# Altium footprint library PBL - SMD Packages.PcbLib: 144 footprints (part 6 of 9)
Each footprint in its own frame and in the unit in brackets; x right, y up, seen from the top. Pads: shape width x height; smd on the part's side, far side on the other; paste and mask are expansions set on the pad; w line width, h text height; cw(c..) or ccw(c..) is an arc to the next point about the centre after c.
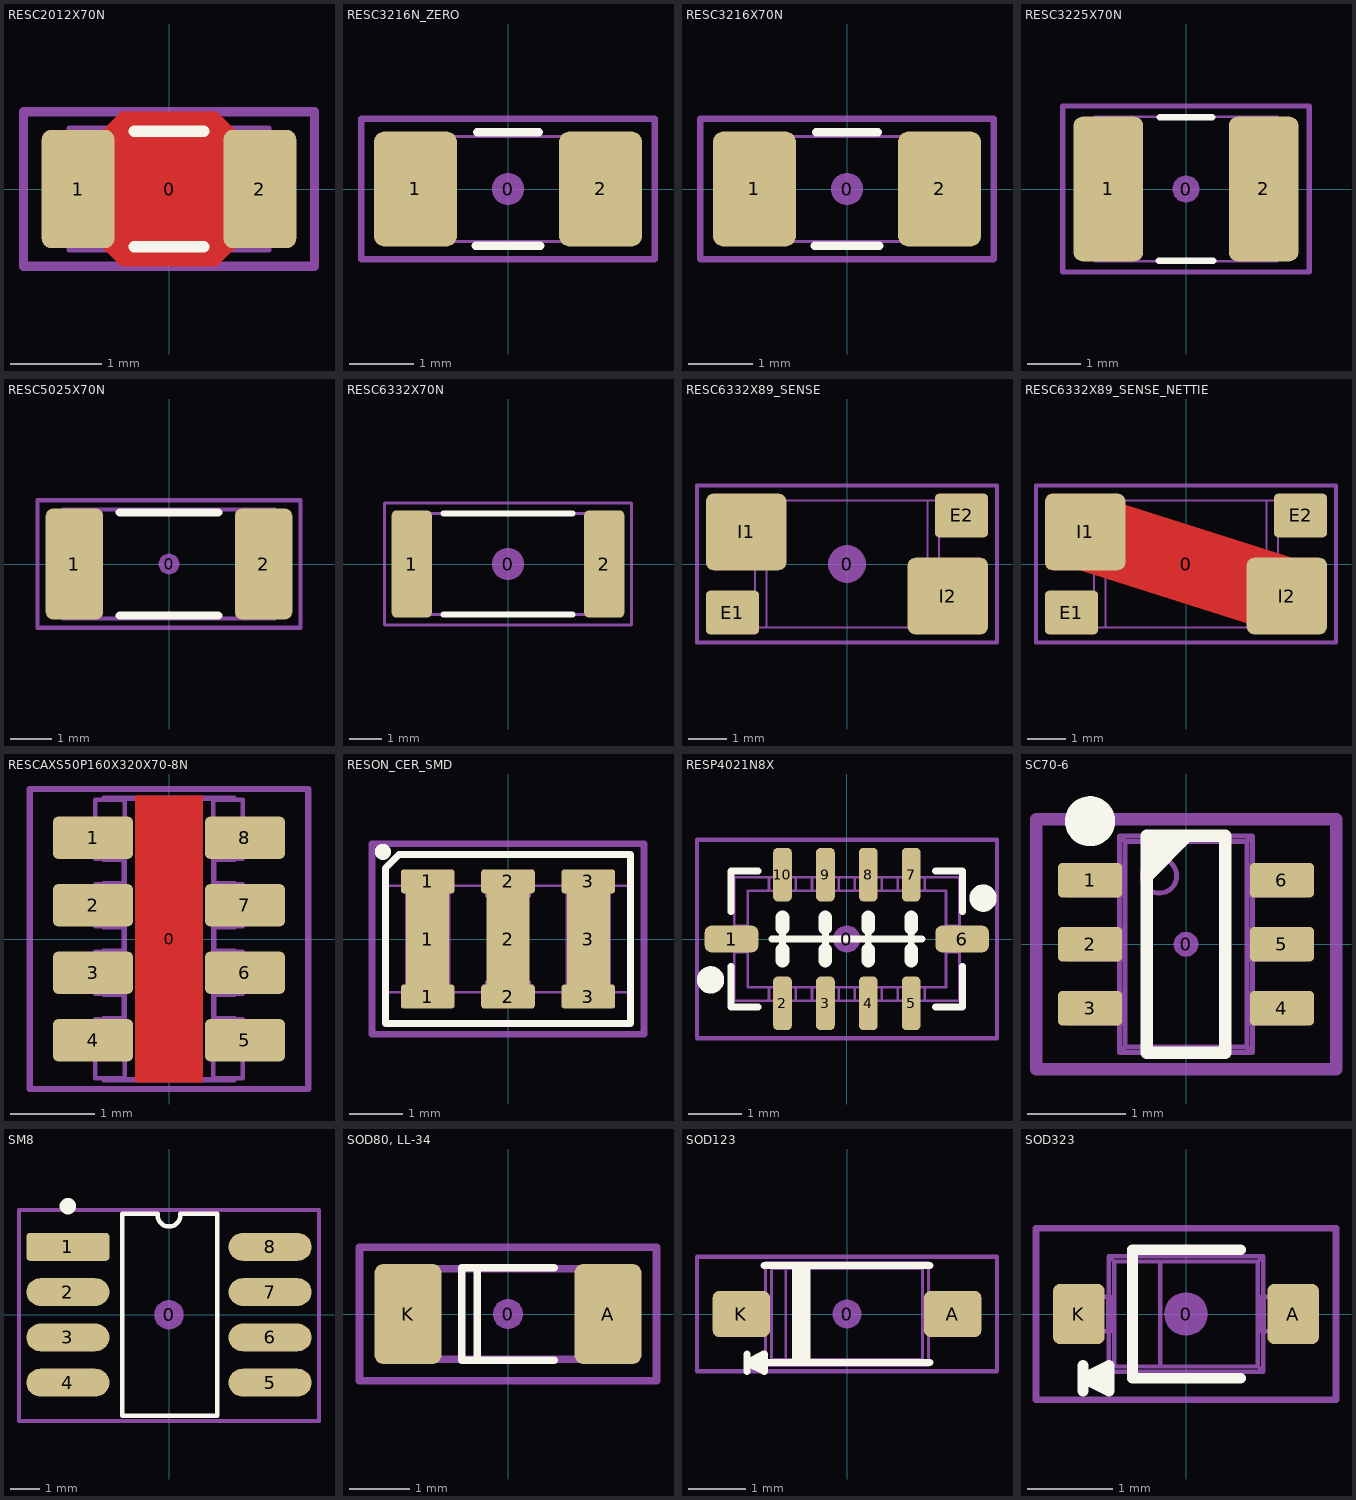
[diagram p5: the footprints below, top view; thin cyan lines are the x and y axes]

## RESC2012X70N [mm] "Chip Resistor, Body 2.0x1.2mm, EIA 0805, IPC Medium Density"
height 0.7
pads (3):
  round 0.254 on Mech15: 0(0,0)
  rrect25% 0.8x1.3 smd: 1(-1,0) 2(1,0)
Top Layer:
  pour cut-out: -0.725,0.65 -0.525,0.85 0.525,0.85 0.725,0.65 0.725,-0.65 0.525,-0.85 -0.525,-0.85 -0.725,-0.65
Top Overlay:
  lines w0.127: -0.381,-0.635 0.381,-0.635 ; -0.381,0.635 0.381,0.635
13 - 3D Top Side:
  lines w0.05: 0.6,-0.674 -0.6,-0.674 ; -0.6,-0.675 -0.6,0.675 -1.1,0.675 -1.1,-0.675 -0.6,-0.675 ; -0.6,-0.674 0.6,-0.674 ; 0.6,-0.675 0.6,0.675 ; 0.6,-0.675 1.1,-0.675 1.1,0.675 0.6,0.675 ; 0.6,0.674 -0.6,0.674 0.6,0.674
15 - Top Courtyards:
  lines w0.1: -1.6,-0.85 1.6,-0.85 1.6,0.85 -1.6,0.85 -1.6,-0.85
3D body: height 0.69, standoff -0.01, extent -1.1,-0.675 1.1,0.675

## RESC3216N_ZERO [mm] "Chip Resistor, Body 3.2x1.6mm, 1206, IPC Medium Density"
height 0.7
pads (3):
  round 0.508 on Mech15: 0(0,0)
  rrect25% 1.3x1.8 smd: 1(-1.45,0) 2(1.45,0)
Top Overlay:
  lines w0.127: -0.508,-0.889 0.508,-0.889 ; -0.483,0.889 0.483,0.889
13 - 3D Top Side:
  lines w0.05: 1.025,-0.824 -1.025,-0.824 1.025,-0.824 ; -1.625,-0.825 -1.025,-0.825 -1.025,0.825 -1.625,0.825 -1.625,-0.825 ; -1.025,0.824 1.025,0.824 -1.025,0.824 ; 1.025,-0.825 1.025,0.825 1.625,0.825 1.625,-0.825 1.025,-0.825
15 - Top Courtyards:
  lines w0.1: -2.3,-1.1 -2.3,1.1 2.3,1.1 2.3,-1.1 -2.3,-1.1
3D body: height 0.69, standoff -0.01, extent -1.625,-0.825 1.625,0.825

## RESC3216X70N [mm] "Chip Resistor, Body 3.2x1.6mm, EIA 1206, IPC Medium Density"
height 0.7
pads (3):
  round 0.508 on Mech15: 0(0,0)
  rrect25% 1.3x1.8 smd: 1(-1.45,0) 2(1.45,0)
Top Overlay:
  lines w0.127: -0.508,-0.889 0.508,-0.889 ; -0.483,0.889 0.483,0.889
13 - 3D Top Side:
  lines w0.05: 1.025,-0.824 -1.025,-0.824 1.025,-0.824 ; -1.625,-0.825 -1.025,-0.825 -1.025,0.825 -1.625,0.825 -1.625,-0.825 ; -1.025,0.824 1.025,0.824 -1.025,0.824 ; 1.025,-0.825 1.025,0.825 1.625,0.825 1.625,-0.825 1.025,-0.825
15 - Top Courtyards:
  lines w0.1: -2.3,-1.1 -2.3,1.1 2.3,1.1 2.3,-1.1 -2.3,-1.1
3D body: height 0.69, standoff -0.01, extent -1.625,-0.825 1.625,0.825

## RESC3225X70N [mm] "Chip Resistor, Body 3.2x2.5mm, EIA 1210, IPC Medium Density"
height 0.7
pads (3):
  round 0.508 on Mech15: 0(0,0)
  rrect25% 1.3x2.7 smd: 1(-1.45,0) 2(1.45,0)
Top Overlay:
  lines w0.127: -0.508,-1.339 0.508,-1.339 ; -0.483,1.339 0.483,1.339
13 - 3D Top Side:
  lines w0.05: -1.7,-1.35 -1.1,-1.35 -1.1,1.35 -1.7,1.35 -1.7,-1.35 ; -1.1,-1.349 1.1,-1.349 -1.1,-1.349 ; -1.1,1.349 1.1,1.349 -1.1,1.349 ; 1.1,-1.35 1.1,1.35 1.7,1.35 1.7,-1.35 1.1,-1.35
15 - Top Courtyards:
  lines w0.1: -2.3,-1.55 -2.3,1.55 2.3,1.55 2.3,-1.55 -2.3,-1.55
3D body: height 0.69, standoff -0.01, extent -1.7,-1.35 1.7,1.35

## RESC5025X70N [mm] "Chip Resistor, Body 5.0x2.5mm, 2010, IPC Medium Density"
height 0.7
pads (3):
  round 0.508 on Mech15: 0(0,0)
  rrect25% 1.4x2.7 smd: 1(-2.3,0) 2(2.3,0)
Top Overlay:
  lines w0.2: -1.2,-1.25 1.2,-1.25 ; -1.2,1.25 1.2,1.25
13 - 3D Top Side:
  lines w0.1: -2.575,-1.325 -2.575,1.325 2.575,1.325 2.575,-1.325 -2.575,-1.325
15 - Top Courtyards:
  lines w0.1: -3.2,-1.55 -3.2,1.55 3.2,1.55 3.2,-1.55 -3.2,-1.55
3D body: height 0.69, standoff -0.01, extent -2.6,-1.35 2.6,1.35

## RESC6332X70N [mm] "Chip Resistor, Body 6.3x3.2mm, 2512, IPC Medium Density"
height 0.7
pads (3):
  round 1 on Mech15: 0(0,0)
  rrect25% 1.25x3.35 smd: 1(-3,0) 2(3,0)
Top Overlay:
  lines w0.2: -2,-1.575 2,-1.575 ; -2,1.575 2,1.575
13 - 3D Top Side:
  lines w0.1: -3.15,-1.575 -3.15,1.575 3.15,1.575 3.15,-1.575 -3.15,-1.575
15 - Top Courtyards:
  lines w0.1: -3.85,-1.9 -3.85,1.9 3.85,1.9 3.85,-1.9 -3.85,-1.9
3D body: height 0.69, standoff -0.01, extent -3.3,-1.7 3.3,1.7

## RESC6332X89_SENSE [mil] "SMD Sense Resistor with Kelvin terminations, Body 6.3x3.2mm, 2512, IPC Medium Density"
height 35.04
pads (5):
  round 39.37 on Mech15: 0(0,0)
  rrect20% 55x45 smd paste-27.56: E1(-118,-50) E2(118,50)
  rrect20% 83x79 smd paste-43.31: I1(-104,33) I2(104,-33)
13 - 3D Top Side:
  circle w1.97: c0,0 r9.84
  lines w1.97: -82.91,-65.45 -82.91,65.45 ; 82.91,-65.45 82.91,65.45 ; -129.92,-65.45 -129.92,-31.99 -94.72,-31.99 -94.72,1.48 -129.92,1.48 -129.92,65.45 129.92,65.45 129.92,31.99 94.72,31.99 94.72,-1.48 129.92,-1.48 129.92,-65.45 -129.92,-65.45
15 - Top Courtyards:
  lines w3.94: -154.53,-80.71 -154.53,80.71 154.53,80.71 154.53,-80.71 -154.53,-80.71
3D body: height 34.84, standoff 0, extent -129.91,-65.45 129.93,65.46

## RESC6332X89_SENSE_NETTIE [mil] "SMD Sense Resistor with Kelvin terminations, Body 6.3x3.2mm, 2512, IPC Medium Density"
height 35.04
pads (5):
  round 39.37 on Mech15: 0(0,0)
  rrect20% 55x45 smd paste-27.56: E1(-118,-50) E2(118,50)
  rrect20% 83x79 smd paste-43.31: I1(-104,33) I2(104,-33)
Top Layer:
  lines w78.74: -104,33 104,-33
13 - 3D Top Side:
  circle w1.97: c0,0 r9.84
  lines w1.97: -82.91,-65.45 -82.91,65.45 ; 82.91,-65.45 82.91,65.45 ; -129.92,-65.45 129.92,-65.45 129.92,-1.48 94.72,-1.48 94.72,31.99 129.92,31.99 129.92,65.45 -129.92,65.45 -129.92,1.48 -94.72,1.48 -94.72,-31.99 -129.92,-31.99 -129.92,-65.45
15 - Top Courtyards:
  lines w3.94: -154.53,-80.71 154.53,-80.71 154.53,80.71 -154.53,80.71 -154.53,-80.71
3D body: height 34.84, standoff 0, extent -129.91,-65.45 129.93,65.46

## RESCAXS50P160X320X70-8N [mm] "Resistor Pack, Body 1.6x3.2mm, 4x0603, IPC Medium Density"
height 0.7
pads (9):
  round 0.254 on Mech15: 0(0,0)
  rrect25% 0.95x0.5 smd: 1(-0.9,1.2) 2(-0.9,0.4) 3(-0.9,-0.4) 4(-0.9,-1.2) 5(0.9,-1.2) 6(0.9,-0.4) 7(0.9,0.4) 8(0.9,1.2)
Top Layer:
  pour cut-out: -0.4,1.7 0.4,1.7 0.4,-1.7 -0.4,-1.7
Top Solder:
  region: 1.3,1.2 0.5,1.2 0.5,-1.2 1.3,-1.2
  rectangle: -1.3,-1.2 -0.5,1.2
13 - 3D Top Side:
  lines w0.05: -0.775,-1.65 -0.775,-1.675 0.775,-1.675 0.775,-1.65 ; -0.775,-0.95 -0.775,-0.938 -0.537,-0.938 -0.537,-0.663 -0.775,-0.663 -0.775,-0.65 ; -0.775,-0.15 -0.775,-0.138 -0.537,-0.138 -0.537,0.138 -0.775,0.138 -0.775,0.15 ; -0.775,0.65 -0.775,0.663 -0.537,0.663 -0.537,0.938 -0.775,0.938 -0.775,0.95 ; -0.775,1.65 -0.775,1.675 0.775,1.675 0.775,1.65 ; -0.525,-1.65 -0.875,-1.65 -0.875,-0.95 -0.525,-0.95 ; -0.525,-0.65 -0.875,-0.65 -0.875,-0.15 -0.525,-0.15 ; -0.525,0.15 -0.875,0.15 -0.875,0.65 -0.525,0.65 ; -0.525,0.95 -0.875,0.95 -0.875,1.65 -0.525,1.65 ; 0.525,-1.65 0.875,-1.65 0.875,-0.95 0.525,-0.95 ; 0.525,-0.65 0.875,-0.65 0.875,-0.15 0.525,-0.15 ; 0.525,0.15 0.875,0.15 0.875,0.65 0.525,0.65 ; 0.525,0.95 0.875,0.95 0.875,1.65 0.525,1.65 ; 0.775,-0.95 0.775,-0.938 0.537,-0.938 0.537,-0.663 0.775,-0.663 0.775,-0.65 ; 0.775,-0.15 0.775,-0.138 0.537,-0.138 0.537,0.138 0.775,0.138 0.775,0.15 ; 0.775,0.65 0.775,0.663 0.537,0.663 0.537,0.938 0.775,0.938 0.775,0.95 ; -0.525,-1.663 -0.525,1.663 0.525,1.663 0.525,-1.663 -0.525,-1.663
15 - Top Courtyards:
  lines w0.076: -1.651,-1.778 -1.651,1.778 1.651,1.778 1.651,-1.778 -1.651,-1.778
3D body: height 0.7, standoff 0, extent -0.875,-1.675 0.875,1.675

## RESON_CER_SMD [mm] "SMD Ceramic Resonator 4.5mmx2mm"
height 1.2
pads (9):
  rrect25% 1x0.45 smd: 1(-1.499,-1.074) 1(-1.499,1.075) 2(0,-1.074) 2(0,1.075) 3(1.499,-1.074) 3(1.499,1.075)
  rrect25% 0.8x2.6 smd: 1(-1.499,0) 2(0,0) 3(1.499,0)
Top Overlay:
  circle w0.15: c-2.336,1.626 r0.075
  lines w0.127: -2.286,-1.575 2.286,-1.575 ; -2.286,-1.549 -2.286,1.321 -2.032,1.575 2.286,1.575 2.286,-1.549
13 - 3D Top Side:
  lines w0.05: -1.9,-0.995 -1.1,-0.995 ; -1.9,-0.995 -1.9,0.995 ; -1.9,-0.995 -2.25,-0.994 -2.25,0.994 -1.9,0.995 ; -1.9,0.995 -1.1,0.995 ; -1.1,-0.995 -1.1,0.995 ; -1.1,-0.995 -0.4,-0.994 ; -1.1,0.994 -0.4,0.995 ; -0.4,-0.995 0.4,-0.995 ; -0.4,-0.995 -0.4,-0.795 0.4,-0.795 0.4,-0.995 ; -0.4,0.995 0.4,0.995 ; -0.4,0.995 -0.4,0.795 0.4,0.795 0.4,0.995 ; 0.4,-0.995 1.1,-0.994 ; 0.4,0.994 1.1,0.995 ; 1.1,-0.995 1.9,-0.995 ; 1.1,-0.995 1.1,0.995 ; 1.1,0.995 1.9,0.995 ; 1.9,-0.995 1.9,0.995 ; 1.9,-0.995 2.25,-0.994 2.25,0.994 1.9,0.995
15 - Top Courtyards:
  lines w0.127: -2.54,-1.778 -2.54,1.778 2.54,1.778 2.54,-1.778 -2.54,-1.778
3D body: height 1.19, standoff 0, extent -2.25,-0.995 2.25,0.995

## RESP4021N8X [mm] "Resistor Pack, Body 4.0x2.1mm, 8 elements bussed, IPC Medium Density"
height 0.65
pads (11):
  round 0.508 on Mech15: 0(0,0)
  rrect50% 1x0.5 smd: 1(-2.15,0) 6(2.15,0)
  rrect50% 0.35x1 smd: 2(-1.2,-1.2) 3(-0.4,-1.2) 4(0.4,-1.2) 5(1.2,-1.2) 7(1.2,1.2) 8(0.4,1.2) 9(-0.4,1.2) 10(-1.2,1.2)
Top Overlay:
  circle w0.254: c-2.54,-0.762 r0.127
  circle w0.254: c2.54,0.762 r0.127
  lines w0.127: -2.159,-0.508 -2.159,-1.27 -1.651,-1.27 ; -2.159,0.508 -2.159,1.27 -1.651,1.27 ; -1.4,0 1.4,0 ; -1.2,-0.2 -1.2,0.2 ; -0.4,-0.2 -0.4,0.2 ; 0.4,-0.2 0.4,0.2 ; 1.2,-0.2 1.2,0.2 ; 1.651,-1.27 2.159,-1.27 2.159,-0.508 ; 1.651,1.27 2.159,1.27 2.159,0.508
  lines w0.254: -1.2,-0.4 -1.2,-0.2 ; -1.2,0.2 -1.2,0.4 ; -0.4,-0.4 -0.4,-0.2 ; -0.4,0.2 -0.4,0.4 ; 0.4,-0.4 0.4,-0.2 ; 0.4,0.2 0.4,0.4 ; 1.2,-0.4 1.2,-0.2 ; 1.2,0.2 1.2,0.4
13 - 3D Top Side:
  lines w0.05: -1.85,-0.25 -2.1,-0.25 ; -1.85,0.25 -2.1,0.25 ; -1.45,-0.9 -1.45,-1.15 ; -1.45,0.9 -1.45,1.15 ; -0.95,-0.9 -0.95,-1.15 ; -0.95,0.9 -0.95,1.15 ; -0.65,-1.149 -0.95,-1.15 ; -0.65,-0.9 -0.65,-1.15 -0.55,-1.15 cw(c-0.4,-1.15) -0.25,-1.15 -0.15,-1.15 ; -0.65,0.9 -0.65,1.15 -0.55,1.15 ccw(c-0.4,1.15) -0.25,1.15 -0.15,1.15 ; -0.65,1.149 -0.95,1.15 ; -0.15,-0.9 -0.15,-1.15 ; -0.15,0.9 -0.15,1.15 ; 0.15,-1.149 -0.15,-1.15 ; 0.15,-0.9 0.15,-1.15 0.25,-1.15 cw(c0.4,-1.15) 0.55,-1.15 0.65,-1.15 ; 0.15,0.9 0.15,1.15 0.25,1.15 ccw(c0.4,1.15) 0.55,1.15 0.65,1.15 ; 0.15,1.149 -0.15,1.15 ; 0.65,-0.9 0.65,-1.15 ; 0.65,0.9 0.65,1.15 ; 0.95,-1.149 0.65,-1.15 ; 0.95,-0.9 0.95,-1.15 1.05,-1.15 cw(c1.2,-1.15) 1.35,-1.15 1.45,-1.15 ; 0.95,0.9 0.95,1.15 1.05,1.15 ccw(c1.2,1.15) 1.35,1.15 1.45,1.15 ; 0.95,1.149 0.65,1.15 ; 1.45,-0.9 1.45,-1.15 ; 1.45,0.9 1.45,1.15 ; 1.85,-0.25 2.1,-0.25 ; 1.85,0.25 2.1,0.25 ; -2.1,-0.25 -2.1,-0.15 ccw(c-2.1,0) -2.1,0.15 -2.1,0.25 ; -2.1,-0.25 -2.099,-1.149 -1.45,-1.15 ; -2.1,0.25 -2.099,1.149 -1.45,1.15 ; -1.45,-1.15 -1.35,-1.15 cw(c-1.2,-1.15) -1.05,-1.15 -0.95,-1.15 ; -1.45,1.15 -1.35,1.15 ccw(c-1.2,1.15) -1.05,1.15 -0.95,1.15 ; 1.45,-1.15 2.099,-1.149 2.1,-0.25 ; 1.45,1.15 2.099,1.149 2.1,0.25 ; 2.1,-0.25 2.1,-0.15 cw(c2.1,0) 2.1,0.15 2.1,0.25 ; -1.85,-0.9 -1.85,0.9 1.85,0.9 1.85,-0.9 -1.85,-0.9
15 - Top Courtyards:
  lines w0.076: -2.794,-1.85 2.8,-1.85 2.8,1.85 -2.794,1.85 -2.794,-1.85
3D body: height 0.65, standoff 0, extent -2.1,-1.15 2.1,1.15

## SC70-6 [mm] "SC70-6; SOT-363"
height 1.6
pads (7):
  round 0.254 on Mech15: 0(0,0)
  rrect25% 0.65x0.35 smd: 1(-0.975,0.65) 2(-0.975,0) 3(-0.975,-0.65) 4(0.975,-0.65) 5(0.975,0) 6(0.975,0.65)
Top Overlay:
  circle w0.254: c-0.975,1.25 r0.127
  region: 0.1,1.1 -0.4,0.6 -0.4,1.1
  lines w0.127: -0.4,-1.1 -0.4,1.1 0.4,1.1 0.4,-1.1 -0.4,-1.1
13 - 3D Top Side:
  circle w0.05: c-0.27,0.695 r0.175
  lines w0.05: -1.028,-0.8 -1.028,-0.5 ; -1.028,-0.15 -1.028,0.15 ; -1.028,0.5 -1.028,0.8 ; -0.937,-0.8 -0.937,-0.5 ; -0.937,-0.15 -0.937,0.15 ; -0.937,0.5 -0.937,0.8 ; -0.925,-0.8 -0.925,-0.5 ; -0.925,-0.15 -0.925,0.15 ; -0.925,0.5 -0.925,0.8 ; 0.925,-0.8 0.925,-0.5 ; 0.925,-0.15 0.925,0.15 ; 0.925,0.5 0.925,0.8 ; 0.937,-0.8 0.937,-0.5 ; 0.937,-0.15 0.937,0.15 ; 0.937,0.5 0.937,0.8 ; 1.028,-0.8 1.028,-0.5 ; 1.028,-0.15 1.028,0.15 ; 1.028,0.5 1.028,0.8 ; -0.675,-1.1 0.675,-1.1 ; -0.675,-1.1 -0.675,1.1 ; -0.675,-1.1 -0.619,-1.044 ; -0.675,1.1 0.675,1.1 ; -0.675,1.1 -0.619,1.044 ; -0.619,-1.044 0.619,-1.044 ; -0.619,-1.044 -0.619,1.044 ; -0.619,1.044 0.619,1.044 ; 0.619,-1.044 0.675,-1.1 ; 0.619,-1.044 0.619,1.044 ; 0.619,1.044 0.675,1.1 ; 0.675,-1.1 0.675,1.1 ; -1.2,-0.8 -1.2,-0.5 -0.654,-0.5 -0.654,-0.8 -1.2,-0.8 ; -1.2,-0.15 -1.2,0.15 -0.654,0.15 -0.654,-0.15 -1.2,-0.15 ; -1.2,0.5 -1.2,0.8 -0.654,0.8 -0.654,0.5 -1.2,0.5 ; 0.654,-0.8 1.2,-0.8 1.2,-0.5 0.654,-0.5 0.654,-0.8 ; 0.654,-0.15 1.2,-0.15 1.2,0.15 0.654,0.15 0.654,-0.15 ; 0.654,0.5 1.2,0.5 1.2,0.8 0.654,0.8 0.654,0.5
15 - Top Courtyards:
  lines w0.127: -1.524,-1.27 -1.524,1.27 1.524,1.27 1.524,-1.27 -1.524,-1.27
3D body: height 1.1, standoff 0, extent -1.2,-1.1 1.2,1.1

## SM8 [mil]
pads (9):
  round 39.37 on Mech15: 0(0,0)
  rrect25% 110x37 smd: 1(-134,90)
  oval 110x37 smd: 2(-134,30) 3(-134,-30) 4(-134,-90) 5(134,-90) 6(134,-30) 7(134,30) 8(134,90)
Top Overlay:
  circle w19.68: c-134,144 r1
  lines w6: -15,132 ccw(c0,132) 15,132 ; -15,134 -29,134 -62,134 -62,-134 64,-134 64,134 15,134
15 - Top Courtyards:
  lines w5: -198.82,-141 -198.82,139 198.82,139 198.82,-141 -198.82,-141
3D body: height 66.93, standoff 0.09, extent -142.75,-129.92 142.76,129.92

## SOD80, LL-34 [mm] "Diode, MiniMELF"
height 1.6
pads (3):
  round 0.5 on Mech15: 0(0,0)
  rrect25% 1.1x1.65 smd: A(1.65,0) K(-1.65,0)
Top Overlay:
  lines w0.127: -0.508,-0.762 -0.508,0.762 ; 0.762,-0.762 -0.762,-0.762 -0.762,0.762 0.762,0.762
13 - 3D Top Side:
  lines w0.127: -1.8,-0.747 -1.8,0.747 1.8,0.747 1.8,-0.747 -1.8,-0.747
15 - Top Courtyards:
  lines w0.127: -2.45,-1.1 -2.45,1.1 2.45,1.1 2.45,-1.1 -2.45,-1.1
3D body: height 1.47, standoff -0.01, extent -1.8,-0.747 1.8,0.747

## SOD123 [mm] "SOD-123; 2 Leads; Body 2.7 x 1.6 mm, (LxW)"
height 1.35
pads (3):
  round 0.508 on Mech15: 0(0,0)
  rrect25% 1x0.8 smd: A(1.85,0) K(-1.85,0)
Top Overlay:
  lines w0.127: -1.75,-1 -1.75,-0.7 ; -1.45,0.85 1.45,0.85 ; -0.9,-0.85 -0.9,0.85 ; -0.8,-0.85 -0.8,0.85 ; -0.7,-0.85 -0.7,0.85 ; 1.448,-0.85 -1.45,-0.85 -1.75,-0.85 ; -1.75,-0.85 -1.45,-0.7 -1.45,-1 -1.75,-0.85
13 - 3D Top Side:
  lines w0.05: -1.766,-0.308 -1.766,0.308 ; -1.707,-0.308 -1.707,0.308 ; -1.517,-0.308 -1.517,0.308 ; -1.425,-0.308 -1.95,-0.308 -1.95,0.308 -1.425,0.308 ; 1.425,-0.308 1.95,-0.308 1.95,0.308 1.425,0.308 ; 1.517,-0.308 1.517,0.308 ; 1.707,-0.308 1.707,0.308 ; 1.766,-0.308 1.766,0.308 ; -1.425,-0.9 -1.425,0.9 ; -1.425,-0.9 -1.323,-0.798 ; -1.425,-0.9 1.425,-0.9 ; -1.425,0.9 1.425,0.9 ; -1.425,0.9 -1.323,0.798 ; -1.323,-0.798 -1.323,0.798 ; -1.323,-0.798 -1.072,-0.798 ; -1.323,0.798 -1.072,0.798 ; -1.072,-0.798 -1.072,0.798 ; -1.072,-0.798 1.322,-0.797 ; -1.072,0.798 1.322,0.797 ; 1.322,-0.797 1.425,-0.9 ; 1.322,-0.797 1.322,0.797 ; 1.322,0.797 1.425,0.9 ; 1.425,-0.9 1.425,0.9
15 - Top Courtyards:
  lines w0.076: -2.625,-1 -2.625,1 2.625,1 2.625,-1 -2.625,-1
3D body: height 1.18, standoff 0, extent -1.95,-0.9 1.95,0.9

## SOD323 [mm] "SOD-323; 2 Leads; Body 1.8 x 1.35 mm, (LxW)"
height 1.15
pads (3):
  round 0.508 on Mech15: 0(0,0)
  rrect25% 0.6x0.7 smd: A(1.25,0) K(-1.25,0)
Top Overlay:
  lines w0.127: -1.2,-0.9 -1.2,-0.6 ; -0.9,-0.75 -1.2,-0.75 ; 0.635,-0.75 -0.625,-0.75 -0.625,0.75 0.635,0.75 ; -1.2,-0.75 -0.9,-0.9 -0.9,-0.6 -1.2,-0.75
13 - 3D Top Side:
  lines w0.05: -1.157,-0.2 -1.157,0.2 ; -1.11,-0.2 -1.11,0.2 ; -0.91,-0.2 -0.91,0.2 ; -0.9,-0.2 -0.9,-0.675 ; -0.9,0.2 -0.9,0.675 ; 0.9,-0.2 0.9,-0.675 ; 0.9,0.2 0.9,0.675 ; 0.91,-0.2 0.91,0.2 ; 1.11,-0.2 1.11,0.2 ; 1.157,-0.2 1.157,0.2 ; -0.9,-0.675 -0.838,-0.613 ; -0.9,-0.675 0.9,-0.675 ; -0.9,0.675 0.9,0.675 ; -0.9,0.675 -0.838,0.613 ; -0.838,-0.613 -0.838,0.613 ; -0.838,-0.613 -0.3,-0.613 ; -0.838,0.613 -0.3,0.613 ; -0.3,-0.613 -0.3,0.613 ; -0.3,-0.613 0.838,-0.613 ; -0.3,0.613 0.838,0.613 ; 0.838,-0.613 0.838,0.613 ; 0.838,-0.613 0.9,-0.675 ; 0.838,0.613 0.9,0.675 ; -1.3,-0.2 -1.3,0.2 -0.879,0.2 -0.879,-0.2 -1.3,-0.2 ; 0.879,-0.2 1.3,-0.2 1.3,0.2 0.879,0.2 0.879,-0.2
15 - Top Courtyards:
  lines w0.076: -1.75,-1 -1.75,1 1.75,1 1.75,-1 -1.75,-1
3D body: height 1.1, standoff 0, extent -1.3,-0.675 1.3,0.675